# Altium footprint library MY_LIB_Connectors_CONNFLY.PcbLib: 239 footprints (part 4 of 15)
Each footprint in its own frame and in the unit in brackets; x right, y up, seen from the top. Pads: shape width x height; smd on the part's side, far side on the other; paste and mask are expansions set on the pad; w line width, h text height; cw(c..) or ccw(c..) is an arc to the next point about the centre after c.
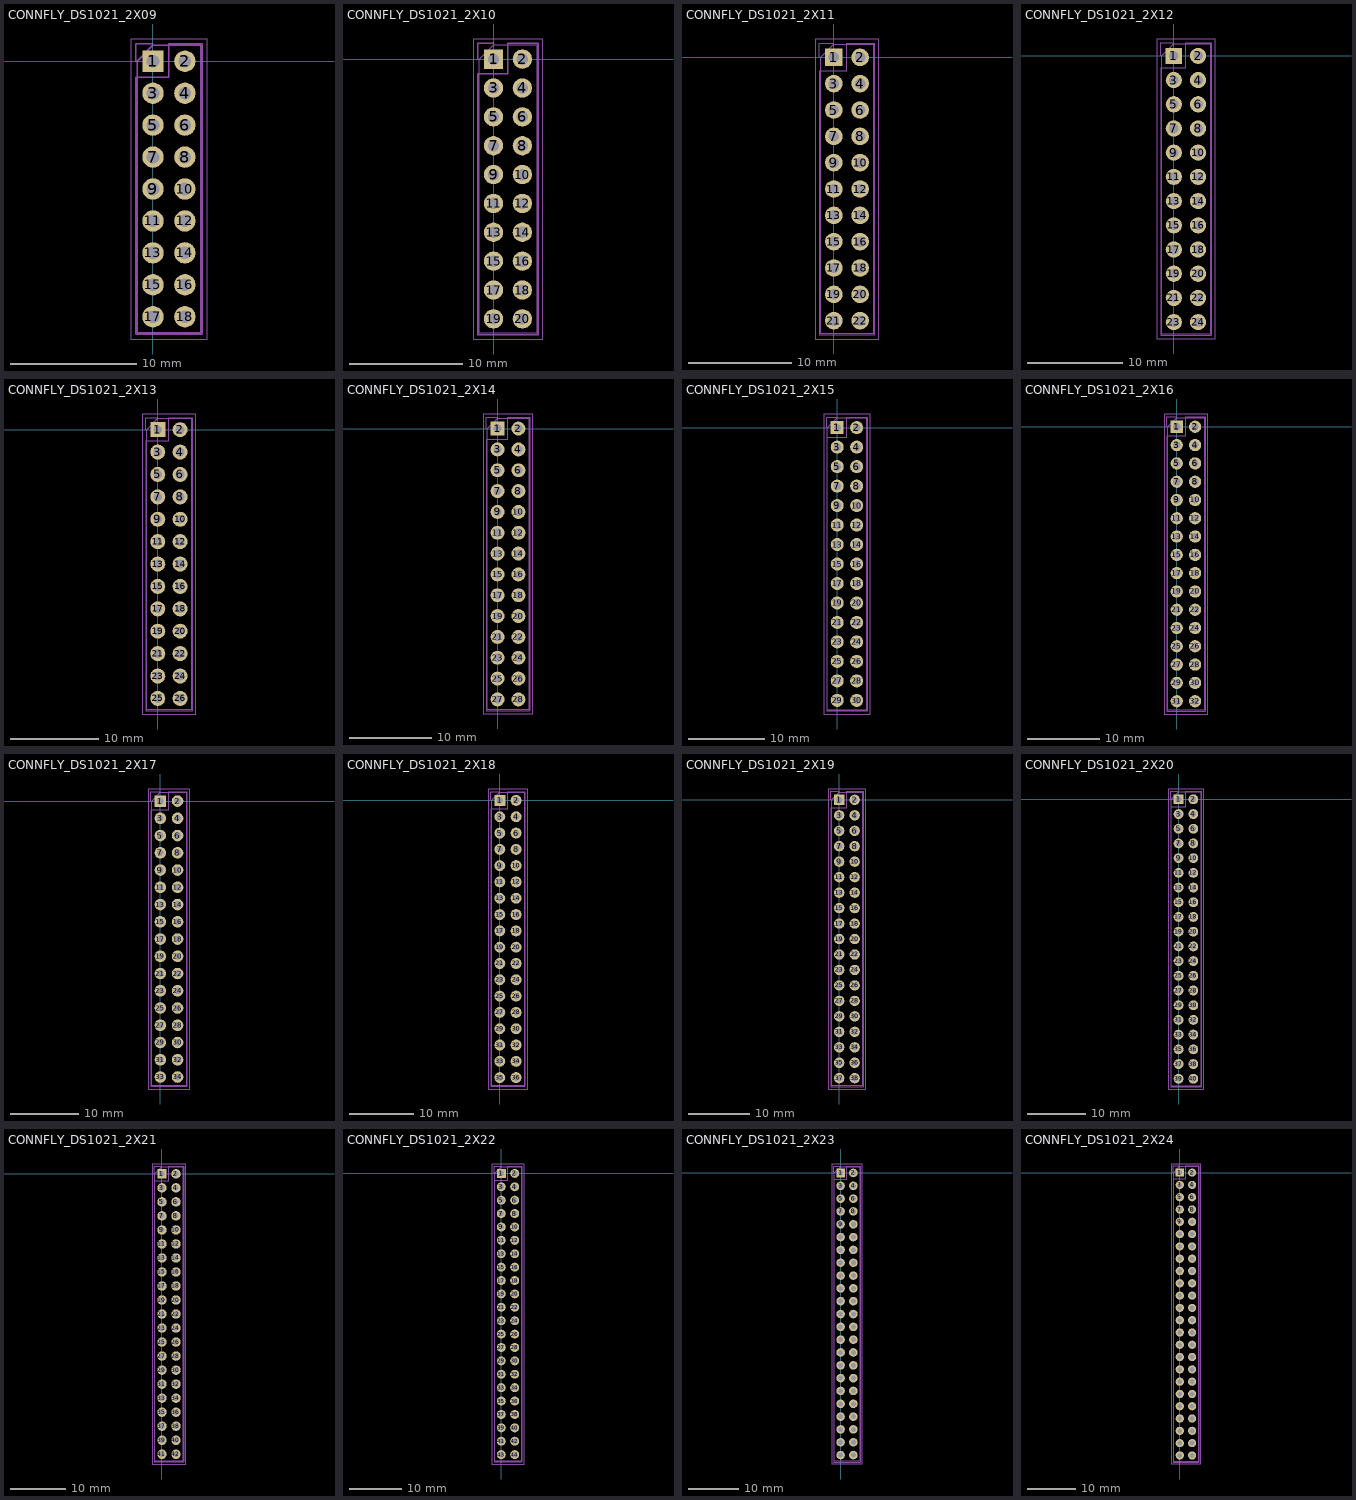
[diagram p3: the footprints below, top view; thin cyan lines are the x and y axes]

## CONNFLY_DS1021_2X09 [mm] "Connfly DS1021 2x9 standard KiCad; PTH1.0 pad1.7 pitch2.54; CC-BY-SA-4.0; STEP generic"
height 8.54
pads (18):
  rect 1.7x1.7 hole 1 paste-2539.97 mask+0.05: 1(0,0)
  round 1.7 hole 1 paste-2539.97 mask+0.05: 2(2.54,0) 3(0,-2.54) 4(2.54,-2.54) 5(0,-5.08) 6(2.54,-5.08) 7(0,-7.62) 8(2.54,-7.62) 9(0,-10.16) 10(2.54,-10.16) 11(0,-12.7) 12(2.54,-12.7) 13(0,-15.24) 14(2.54,-15.24) 15(0,-17.78) 16(2.54,-17.78) 17(0,-20.32) 18(2.54,-20.32)
Mechanical 15:
  lines w0.05: -1.77,-22.09 -1.77,1.77 4.32,1.77 4.32,-22.09 -1.77,-22.09
  lines w0.1: -1.27,-21.59 -1.27,0 0,1.27 3.81,1.27 3.81,-21.59 -1.27,-21.59
  lines w0.12: -1.38,0 -1.38,1.38 0,1.38 ; -1.38,-21.7 -1.38,-1.27 1.27,-1.27 1.27,1.38 3.92,1.38 3.92,-21.7 -1.38,-21.7
3D body "PinHeader_2x09_P2.54mm_Vertical.step": height 8.54, standoff -3, extent -1.27,-21.59 3.81,1.27

## CONNFLY_DS1021_2X10 [mm] "Connfly DS1021 2x10 standard KiCad; PTH1.0 pad1.7 pitch2.54; CC-BY-SA-4.0; STEP generic"
height 8.54
pads (20):
  rect 1.7x1.7 hole 1 paste-2539.97 mask+0.05: 1(0,0)
  round 1.7 hole 1 paste-2539.97 mask+0.05: 2(2.54,0) 3(0,-2.54) 4(2.54,-2.54) 5(0,-5.08) 6(2.54,-5.08) 7(0,-7.62) 8(2.54,-7.62) 9(0,-10.16) 10(2.54,-10.16) 11(0,-12.7) 12(2.54,-12.7) 13(0,-15.24) 14(2.54,-15.24) 15(0,-17.78) 16(2.54,-17.78) 17(0,-20.32) 18(2.54,-20.32) 19(0,-22.86) 20(2.54,-22.86)
Mechanical 15:
  lines w0.05: -1.77,-24.63 -1.77,1.77 4.32,1.77 4.32,-24.63 -1.77,-24.63
  lines w0.1: -1.27,-24.13 -1.27,0 0,1.27 3.81,1.27 3.81,-24.13 -1.27,-24.13
  lines w0.12: -1.38,0 -1.38,1.38 0,1.38 ; -1.38,-24.24 -1.38,-1.27 1.27,-1.27 1.27,1.38 3.92,1.38 3.92,-24.24 -1.38,-24.24
3D body "PinHeader_2x10_P2.54mm_Vertical.step": height 8.54, standoff -3, extent -1.27,-24.13 3.81,1.27

## CONNFLY_DS1021_2X11 [mm] "Connfly DS1021 2x11 standard KiCad; PTH1.0 pad1.7 pitch2.54; CC-BY-SA-4.0; STEP generic"
height 8.54
pads (22):
  rect 1.7x1.7 hole 1 paste-2539.97 mask+0.05: 1(0,0)
  round 1.7 hole 1 paste-2539.97 mask+0.05: 2(2.54,0) 3(0,-2.54) 4(2.54,-2.54) 5(0,-5.08) 6(2.54,-5.08) 7(0,-7.62) 8(2.54,-7.62) 9(0,-10.16) 10(2.54,-10.16) 11(0,-12.7) 12(2.54,-12.7) 13(0,-15.24) 14(2.54,-15.24) 15(0,-17.78) 16(2.54,-17.78) 17(0,-20.32) 18(2.54,-20.32) 19(0,-22.86) 20(2.54,-22.86) 21(0,-25.4) 22(2.54,-25.4)
Mechanical 15:
  lines w0.05: -1.77,-27.17 -1.77,1.77 4.32,1.77 4.32,-27.17 -1.77,-27.17
  lines w0.1: -1.27,-26.67 -1.27,0 0,1.27 3.81,1.27 3.81,-26.67 -1.27,-26.67
  lines w0.12: -1.38,0 -1.38,1.38 0,1.38 ; -1.38,-26.78 -1.38,-1.27 1.27,-1.27 1.27,1.38 3.92,1.38 3.92,-26.78 -1.38,-26.78
3D body "PinHeader_2x11_P2.54mm_Vertical.step": height 8.54, standoff -3, extent -1.27,-26.67 3.81,1.27

## CONNFLY_DS1021_2X12 [mm] "Connfly DS1021 2x12 standard KiCad; PTH1.0 pad1.7 pitch2.54; CC-BY-SA-4.0; STEP generic"
height 8.54
pads (24):
  rect 1.7x1.7 hole 1 paste-2539.97 mask+0.05: 1(0,0)
  round 1.7 hole 1 paste-2539.97 mask+0.05: 2(2.54,0) 3(0,-2.54) 4(2.54,-2.54) 5(0,-5.08) 6(2.54,-5.08) 7(0,-7.62) 8(2.54,-7.62) 9(0,-10.16) 10(2.54,-10.16) 11(0,-12.7) 12(2.54,-12.7) 13(0,-15.24) 14(2.54,-15.24) 15(0,-17.78) 16(2.54,-17.78) 17(0,-20.32) 18(2.54,-20.32) 19(0,-22.86) 20(2.54,-22.86) 21(0,-25.4) 22(2.54,-25.4) 23(0,-27.94) 24(2.54,-27.94)
Mechanical 15:
  lines w0.05: -1.77,-29.71 -1.77,1.77 4.32,1.77 4.32,-29.71 -1.77,-29.71
  lines w0.1: -1.27,-29.21 -1.27,0 0,1.27 3.81,1.27 3.81,-29.21 -1.27,-29.21
  lines w0.12: -1.38,0 -1.38,1.38 0,1.38 ; -1.38,-29.32 -1.38,-1.27 1.27,-1.27 1.27,1.38 3.92,1.38 3.92,-29.32 -1.38,-29.32
3D body "PinHeader_2x12_P2.54mm_Vertical.step": height 8.54, standoff -3, extent -1.27,-29.21 3.81,1.27

## CONNFLY_DS1021_2X13 [mm] "Connfly DS1021 2x13 standard KiCad; PTH1.0 pad1.7 pitch2.54; CC-BY-SA-4.0; STEP generic"
height 8.54
pads (26):
  rect 1.7x1.7 hole 1 paste-2539.97 mask+0.05: 1(0,0)
  round 1.7 hole 1 paste-2539.97 mask+0.05: 2(2.54,0) 3(0,-2.54) 4(2.54,-2.54) 5(0,-5.08) 6(2.54,-5.08) 7(0,-7.62) 8(2.54,-7.62) 9(0,-10.16) 10(2.54,-10.16) 11(0,-12.7) 12(2.54,-12.7) 13(0,-15.24) 14(2.54,-15.24) 15(0,-17.78) 16(2.54,-17.78) 17(0,-20.32) 18(2.54,-20.32) 19(0,-22.86) 20(2.54,-22.86) 21(0,-25.4) 22(2.54,-25.4) 23(0,-27.94) 24(2.54,-27.94) 25(0,-30.48) 26(2.54,-30.48)
Mechanical 15:
  lines w0.05: -1.77,-32.25 -1.77,1.78 4.32,1.78 4.32,-32.25 -1.77,-32.25
  lines w0.1: -1.27,-31.75 -1.27,0 0,1.27 3.81,1.27 3.81,-31.75 -1.27,-31.75
  lines w0.12: -1.38,0 -1.38,1.38 0,1.38 ; -1.38,-31.86 -1.38,-1.27 1.27,-1.27 1.27,1.38 3.92,1.38 3.92,-31.86 -1.38,-31.86
3D body "PinHeader_2x13_P2.54mm_Vertical.step": height 8.54, standoff -3, extent -1.27,-31.75 3.81,1.27

## CONNFLY_DS1021_2X14 [mm] "Connfly DS1021 2x14 standard KiCad; PTH1.0 pad1.7 pitch2.54; CC-BY-SA-4.0; STEP generic"
height 8.54
pads (28):
  rect 1.7x1.7 hole 1 paste-2539.97 mask+0.05: 1(0,0)
  round 1.7 hole 1 paste-2539.97 mask+0.05: 2(2.54,0) 3(0,-2.54) 4(2.54,-2.54) 5(0,-5.08) 6(2.54,-5.08) 7(0,-7.62) 8(2.54,-7.62) 9(0,-10.16) 10(2.54,-10.16) 11(0,-12.7) 12(2.54,-12.7) 13(0,-15.24) 14(2.54,-15.24) 15(0,-17.78) 16(2.54,-17.78) 17(0,-20.32) 18(2.54,-20.32) 19(0,-22.86) 20(2.54,-22.86) 21(0,-25.4) 22(2.54,-25.4) 23(0,-27.94) 24(2.54,-27.94) 25(0,-30.48) 26(2.54,-30.48) 27(0,-33.02) 28(2.54,-33.02)
Mechanical 15:
  lines w0.05: -1.77,-34.8 -1.77,1.78 4.32,1.78 4.32,-34.8 -1.77,-34.8
  lines w0.1: -1.27,-34.29 -1.27,0 0,1.27 3.81,1.27 3.81,-34.29 -1.27,-34.29
  lines w0.12: -1.38,0 -1.38,1.38 0,1.38 ; -1.38,-34.4 -1.38,-1.27 1.27,-1.27 1.27,1.38 3.92,1.38 3.92,-34.4 -1.38,-34.4
3D body "PinHeader_2x14_P2.54mm_Vertical.step": height 8.54, standoff -3, extent -1.27,-34.29 3.81,1.27

## CONNFLY_DS1021_2X15 [mm] "Connfly DS1021 2x15 standard KiCad; PTH1.0 pad1.7 pitch2.54; CC-BY-SA-4.0; STEP generic"
height 8.54
pads (30):
  rect 1.7x1.7 hole 1 paste-2539.97 mask+0.05: 1(0,0)
  round 1.7 hole 1 paste-2539.97 mask+0.05: 2(2.54,0) 3(0,-2.54) 4(2.54,-2.54) 5(0,-5.08) 6(2.54,-5.08) 7(0,-7.62) 8(2.54,-7.62) 9(0,-10.16) 10(2.54,-10.16) 11(0,-12.7) 12(2.54,-12.7) 13(0,-15.24) 14(2.54,-15.24) 15(0,-17.78) 16(2.54,-17.78) 17(0,-20.32) 18(2.54,-20.32) 19(0,-22.86) 20(2.54,-22.86) 21(0,-25.4) 22(2.54,-25.4) 23(0,-27.94) 24(2.54,-27.94) 25(0,-30.48) 26(2.54,-30.48) 27(0,-33.02) 28(2.54,-33.02) 29(0,-35.56) 30(2.54,-35.56)
Mechanical 15:
  lines w0.05: -1.77,-37.34 -1.77,1.78 4.32,1.78 4.32,-37.34 -1.77,-37.34
  lines w0.1: -1.27,-36.83 -1.27,0 0,1.27 3.81,1.27 3.81,-36.83 -1.27,-36.83
  lines w0.12: -1.38,0 -1.38,1.38 0,1.38 ; -1.38,-36.94 -1.38,-1.27 1.27,-1.27 1.27,1.38 3.92,1.38 3.92,-36.94 -1.38,-36.94
3D body "PinHeader_2x15_P2.54mm_Vertical.step": height 8.54, standoff -3, extent -1.27,-36.83 3.81,1.27

## CONNFLY_DS1021_2X16 [mm] "Connfly DS1021 2x16 standard KiCad; PTH1.0 pad1.7 pitch2.54; CC-BY-SA-4.0; STEP generic"
height 8.54
pads (32):
  rect 1.7x1.7 hole 1 paste-2539.97 mask+0.05: 1(0,0)
  round 1.7 hole 1 paste-2539.97 mask+0.05: 2(2.54,0) 3(0,-2.54) 4(2.54,-2.54) 5(0,-5.08) 6(2.54,-5.08) 7(0,-7.62) 8(2.54,-7.62) 9(0,-10.16) 10(2.54,-10.16) 11(0,-12.7) 12(2.54,-12.7) 13(0,-15.24) 14(2.54,-15.24) 15(0,-17.78) 16(2.54,-17.78) 17(0,-20.32) 18(2.54,-20.32) 19(0,-22.86) 20(2.54,-22.86) 21(0,-25.4) 22(2.54,-25.4) 23(0,-27.94) 24(2.54,-27.94) 25(0,-30.48) 26(2.54,-30.48) 27(0,-33.02) 28(2.54,-33.02) 29(0,-35.56) 30(2.54,-35.56) 31(0,-38.1) 32(2.54,-38.1)
Mechanical 15:
  lines w0.05: -1.77,-39.88 -1.77,1.78 4.32,1.78 4.32,-39.88 -1.77,-39.88
  lines w0.1: -1.27,-39.37 -1.27,0 0,1.27 3.81,1.27 3.81,-39.37 -1.27,-39.37
  lines w0.12: -1.38,0 -1.38,1.38 0,1.38 ; -1.38,-39.48 -1.38,-1.27 1.27,-1.27 1.27,1.38 3.92,1.38 3.92,-39.48 -1.38,-39.48
3D body "PinHeader_2x16_P2.54mm_Vertical.step": height 8.54, standoff -3, extent -1.27,-39.37 3.81,1.27

## CONNFLY_DS1021_2X17 [mm] "Connfly DS1021 2x17 standard KiCad; PTH1.0 pad1.7 pitch2.54; CC-BY-SA-4.0; STEP generic"
height 8.54
pads (34):
  rect 1.7x1.7 hole 1 paste-2539.97 mask+0.05: 1(0,0)
  round 1.7 hole 1 paste-2539.97 mask+0.05: 2(2.54,0) 3(0,-2.54) 4(2.54,-2.54) 5(0,-5.08) 6(2.54,-5.08) 7(0,-7.62) 8(2.54,-7.62) 9(0,-10.16) 10(2.54,-10.16) 11(0,-12.7) 12(2.54,-12.7) 13(0,-15.24) 14(2.54,-15.24) 15(0,-17.78) 16(2.54,-17.78) 17(0,-20.32) 18(2.54,-20.32) 19(0,-22.86) 20(2.54,-22.86) 21(0,-25.4) 22(2.54,-25.4) 23(0,-27.94) 24(2.54,-27.94) 25(0,-30.48) 26(2.54,-30.48) 27(0,-33.02) 28(2.54,-33.02) 29(0,-35.56) 30(2.54,-35.56) 31(0,-38.1) 32(2.54,-38.1) 33(0,-40.64) 34(2.54,-40.64)
Mechanical 15:
  lines w0.05: -1.77,-42.41 -1.77,1.78 4.32,1.78 4.32,-42.41 -1.77,-42.41
  lines w0.1: -1.27,-41.91 -1.27,0 0,1.27 3.81,1.27 3.81,-41.91 -1.27,-41.91
  lines w0.12: -1.38,0 -1.38,1.38 0,1.38 ; -1.38,-42.02 -1.38,-1.27 1.27,-1.27 1.27,1.38 3.92,1.38 3.92,-42.02 -1.38,-42.02
3D body "PinHeader_2x17_P2.54mm_Vertical.step": height 8.54, standoff -3, extent -1.27,-41.91 3.81,1.27

## CONNFLY_DS1021_2X18 [mm] "Connfly DS1021 2x18 standard KiCad; PTH1.0 pad1.7 pitch2.54; CC-BY-SA-4.0; STEP generic"
height 8.54
pads (36):
  rect 1.7x1.7 hole 1 paste-2539.97 mask+0.05: 1(0,0)
  round 1.7 hole 1 paste-2539.97 mask+0.05: 2(2.54,0) 3(0,-2.54) 4(2.54,-2.54) 5(0,-5.08) 6(2.54,-5.08) 7(0,-7.62) 8(2.54,-7.62) 9(0,-10.16) 10(2.54,-10.16) 11(0,-12.7) 12(2.54,-12.7) 13(0,-15.24) 14(2.54,-15.24) 15(0,-17.78) 16(2.54,-17.78) 17(0,-20.32) 18(2.54,-20.32) 19(0,-22.86) 20(2.54,-22.86) 21(0,-25.4) 22(2.54,-25.4) 23(0,-27.94) 24(2.54,-27.94) 25(0,-30.48) 26(2.54,-30.48) 27(0,-33.02) 28(2.54,-33.02) 29(0,-35.56) 30(2.54,-35.56) 31(0,-38.1) 32(2.54,-38.1) 33(0,-40.64) 34(2.54,-40.64) 35(0,-43.18) 36(2.54,-43.18)
Mechanical 15:
  lines w0.05: -1.77,-44.95 -1.77,1.78 4.32,1.78 4.32,-44.95 -1.77,-44.95
  lines w0.1: -1.27,-44.45 -1.27,0 0,1.27 3.81,1.27 3.81,-44.45 -1.27,-44.45
  lines w0.12: -1.38,0 -1.38,1.38 0,1.38 ; -1.38,-44.56 -1.38,-1.27 1.27,-1.27 1.27,1.38 3.92,1.38 3.92,-44.56 -1.38,-44.56
3D body "PinHeader_2x18_P2.54mm_Vertical.step": height 8.54, standoff -3, extent -1.27,-44.45 3.81,1.27

## CONNFLY_DS1021_2X19 [mm] "Connfly DS1021 2x19 standard KiCad; PTH1.0 pad1.7 pitch2.54; CC-BY-SA-4.0; STEP generic"
height 8.54
pads (38):
  rect 1.7x1.7 hole 1 paste-2539.97 mask+0.05: 1(0,0)
  round 1.7 hole 1 paste-2539.97 mask+0.05: 2(2.54,0) 3(0,-2.54) 4(2.54,-2.54) 5(0,-5.08) 6(2.54,-5.08) 7(0,-7.62) 8(2.54,-7.62) 9(0,-10.16) 10(2.54,-10.16) 11(0,-12.7) 12(2.54,-12.7) 13(0,-15.24) 14(2.54,-15.24) 15(0,-17.78) 16(2.54,-17.78) 17(0,-20.32) 18(2.54,-20.32) 19(0,-22.86) 20(2.54,-22.86) 21(0,-25.4) 22(2.54,-25.4) 23(0,-27.94) 24(2.54,-27.94) 25(0,-30.48) 26(2.54,-30.48) 27(0,-33.02) 28(2.54,-33.02) 29(0,-35.56) 30(2.54,-35.56) 31(0,-38.1) 32(2.54,-38.1) 33(0,-40.64) 34(2.54,-40.64) 35(0,-43.18) 36(2.54,-43.18) 37(0,-45.72) 38(2.54,-45.72)
Mechanical 15:
  lines w0.05: -1.77,-47.49 -1.77,1.78 4.32,1.78 4.32,-47.49 -1.77,-47.49
  lines w0.1: -1.27,-46.99 -1.27,0 0,1.27 3.81,1.27 3.81,-46.99 -1.27,-46.99
  lines w0.12: -1.38,0 -1.38,1.38 0,1.38 ; -1.38,-47.1 -1.38,-1.27 1.27,-1.27 1.27,1.38 3.92,1.38 3.92,-47.1 -1.38,-47.1
3D body "PinHeader_2x19_P2.54mm_Vertical.step": height 8.54, standoff -3, extent -1.27,-46.99 3.81,1.27

## CONNFLY_DS1021_2X20 [mm] "Connfly DS1021 2x20 standard KiCad; PTH1.0 pad1.7 pitch2.54; CC-BY-SA-4.0; STEP generic"
height 8.54
pads (40):
  rect 1.7x1.7 hole 1 paste-2539.97 mask+0.05: 1(0,0)
  round 1.7 hole 1 paste-2539.97 mask+0.05: 2(2.54,0) 3(0,-2.54) 4(2.54,-2.54) 5(0,-5.08) 6(2.54,-5.08) 7(0,-7.62) 8(2.54,-7.62) 9(0,-10.16) 10(2.54,-10.16) 11(0,-12.7) 12(2.54,-12.7) 13(0,-15.24) 14(2.54,-15.24) 15(0,-17.78) 16(2.54,-17.78) 17(0,-20.32) 18(2.54,-20.32) 19(0,-22.86) 20(2.54,-22.86) 21(0,-25.4) 22(2.54,-25.4) 23(0,-27.94) 24(2.54,-27.94) 25(0,-30.48) 26(2.54,-30.48) 27(0,-33.02) 28(2.54,-33.02) 29(0,-35.56) 30(2.54,-35.56) 31(0,-38.1) 32(2.54,-38.1) 33(0,-40.64) 34(2.54,-40.64) 35(0,-43.18) 36(2.54,-43.18) 37(0,-45.72) 38(2.54,-45.72) 39(0,-48.26) 40(2.54,-48.26)
Mechanical 15:
  lines w0.05: -1.77,-50.03 -1.77,1.78 4.32,1.78 4.32,-50.03 -1.77,-50.03
  lines w0.1: -1.27,-49.53 -1.27,0 0,1.27 3.81,1.27 3.81,-49.53 -1.27,-49.53
  lines w0.12: -1.38,0 -1.38,1.38 0,1.38 ; -1.38,-49.64 -1.38,-1.27 1.27,-1.27 1.27,1.38 3.92,1.38 3.92,-49.64 -1.38,-49.64
3D body "PinHeader_2x20_P2.54mm_Vertical.step": height 8.54, standoff -3, extent -1.27,-49.53 3.81,1.27

## CONNFLY_DS1021_2X21 [mm] "Connfly DS1021 2x21 standard KiCad; PTH1.0 pad1.7 pitch2.54; CC-BY-SA-4.0; STEP generic"
height 8.54
pads (42):
  rect 1.7x1.7 hole 1 paste-2539.97 mask+0.05: 1(0,0)
  round 1.7 hole 1 paste-2539.97 mask+0.05: 2(2.54,0) 3(0,-2.54) 4(2.54,-2.54) 5(0,-5.08) 6(2.54,-5.08) 7(0,-7.62) 8(2.54,-7.62) 9(0,-10.16) 10(2.54,-10.16) 11(0,-12.7) 12(2.54,-12.7) 13(0,-15.24) 14(2.54,-15.24) 15(0,-17.78) 16(2.54,-17.78) 17(0,-20.32) 18(2.54,-20.32) 19(0,-22.86) 20(2.54,-22.86) 21(0,-25.4) 22(2.54,-25.4) 23(0,-27.94) 24(2.54,-27.94) 25(0,-30.48) 26(2.54,-30.48) 27(0,-33.02) 28(2.54,-33.02) 29(0,-35.56) 30(2.54,-35.56) 31(0,-38.1) 32(2.54,-38.1) 33(0,-40.64) 34(2.54,-40.64) 35(0,-43.18) 36(2.54,-43.18) 37(0,-45.72) 38(2.54,-45.72) 39(0,-48.26) 40(2.54,-48.26) 41(0,-50.8) 42(2.54,-50.8)
Mechanical 15:
  lines w0.05: -1.77,-52.57 -1.77,1.78 4.32,1.78 4.32,-52.57 -1.77,-52.57
  lines w0.1: -1.27,-52.07 -1.27,0 0,1.27 3.81,1.27 3.81,-52.07 -1.27,-52.07
  lines w0.12: -1.38,0 -1.38,1.38 0,1.38 ; -1.38,-52.18 -1.38,-1.27 1.27,-1.27 1.27,1.38 3.92,1.38 3.92,-52.18 -1.38,-52.18
3D body "PinHeader_2x21_P2.54mm_Vertical.step": height 8.54, standoff -3, extent -1.27,-52.07 3.81,1.27

## CONNFLY_DS1021_2X22 [mm] "Connfly DS1021 2x22 standard KiCad; PTH1.0 pad1.7 pitch2.54; CC-BY-SA-4.0; STEP generic"
height 8.54
pads (44):
  rect 1.7x1.7 hole 1 paste-2539.97 mask+0.05: 1(0,0)
  round 1.7 hole 1 paste-2539.97 mask+0.05: 2(2.54,0) 3(0,-2.54) 4(2.54,-2.54) 5(0,-5.08) 6(2.54,-5.08) 7(0,-7.62) 8(2.54,-7.62) 9(0,-10.16) 10(2.54,-10.16) 11(0,-12.7) 12(2.54,-12.7) 13(0,-15.24) 14(2.54,-15.24) 15(0,-17.78) 16(2.54,-17.78) 17(0,-20.32) 18(2.54,-20.32) 19(0,-22.86) 20(2.54,-22.86) 21(0,-25.4) 22(2.54,-25.4) 23(0,-27.94) 24(2.54,-27.94) 25(0,-30.48) 26(2.54,-30.48) 27(0,-33.02) 28(2.54,-33.02) 29(0,-35.56) 30(2.54,-35.56) 31(0,-38.1) 32(2.54,-38.1) 33(0,-40.64) 34(2.54,-40.64) 35(0,-43.18) 36(2.54,-43.18) 37(0,-45.72) 38(2.54,-45.72) 39(0,-48.26) 40(2.54,-48.26) 41(0,-50.8) 42(2.54,-50.8) 43(0,-53.34) 44(2.54,-53.34)
Mechanical 15:
  lines w0.05: -1.77,-55.12 -1.77,1.78 4.32,1.78 4.32,-55.12 -1.77,-55.12
  lines w0.1: -1.27,-54.61 -1.27,0 0,1.27 3.81,1.27 3.81,-54.61 -1.27,-54.61
  lines w0.12: -1.38,0 -1.38,1.38 0,1.38 ; -1.38,-54.72 -1.38,-1.27 1.27,-1.27 1.27,1.38 3.92,1.38 3.92,-54.72 -1.38,-54.72
3D body "PinHeader_2x22_P2.54mm_Vertical.step": height 8.54, standoff -3, extent -1.27,-54.61 3.81,1.27

## CONNFLY_DS1021_2X23 [mm] "Connfly DS1021 2x23 standard KiCad; PTH1.0 pad1.7 pitch2.54; CC-BY-SA-4.0; STEP generic"
height 8.54
pads (46):
  rect 1.7x1.7 hole 1 paste-2539.97 mask+0.05: 1(0,0)
  round 1.7 hole 1 paste-2539.97 mask+0.05: 2(2.54,0) 3(0,-2.54) 4(2.54,-2.54) 5(0,-5.08) 6(2.54,-5.08) 7(0,-7.62) 8(2.54,-7.62) 9(0,-10.16) 10(2.54,-10.16) 11(0,-12.7) 12(2.54,-12.7) 13(0,-15.24) 14(2.54,-15.24) 15(0,-17.78) 16(2.54,-17.78) 17(0,-20.32) 18(2.54,-20.32) 19(0,-22.86) 20(2.54,-22.86) 21(0,-25.4) 22(2.54,-25.4) 23(0,-27.94) 24(2.54,-27.94) 25(0,-30.48) 26(2.54,-30.48) 27(0,-33.02) 28(2.54,-33.02) 29(0,-35.56) 30(2.54,-35.56) 31(0,-38.1) 32(2.54,-38.1) 33(0,-40.64) 34(2.54,-40.64) 35(0,-43.18) 36(2.54,-43.18) 37(0,-45.72) 38(2.54,-45.72) 39(0,-48.26) 40(2.54,-48.26) 41(0,-50.8) 42(2.54,-50.8) 43(0,-53.34) 44(2.54,-53.34) 45(0,-55.88) 46(2.54,-55.88)
Mechanical 15:
  lines w0.05: -1.77,-57.65 -1.77,1.78 4.32,1.78 4.32,-57.65 -1.77,-57.65
  lines w0.1: -1.27,-57.15 -1.27,0 0,1.27 3.81,1.27 3.81,-57.15 -1.27,-57.15
  lines w0.12: -1.38,0 -1.38,1.38 0,1.38 ; -1.38,-57.26 -1.38,-1.27 1.27,-1.27 1.27,1.38 3.92,1.38 3.92,-57.26 -1.38,-57.26
3D body "PinHeader_2x23_P2.54mm_Vertical.step": height 8.54, standoff -3, extent -1.27,-57.15 3.81,1.27

## CONNFLY_DS1021_2X24 [mm] "Connfly DS1021 2x24 standard KiCad; PTH1.0 pad1.7 pitch2.54; CC-BY-SA-4.0; STEP generic"
height 8.54
pads (48):
  rect 1.7x1.7 hole 1 paste-2539.97 mask+0.05: 1(0,0)
  round 1.7 hole 1 paste-2539.97 mask+0.05: 2(2.54,0) 3(0,-2.54) 4(2.54,-2.54) 5(0,-5.08) 6(2.54,-5.08) 7(0,-7.62) 8(2.54,-7.62) 9(0,-10.16) 10(2.54,-10.16) 11(0,-12.7) 12(2.54,-12.7) 13(0,-15.24) 14(2.54,-15.24) 15(0,-17.78) 16(2.54,-17.78) 17(0,-20.32) 18(2.54,-20.32) 19(0,-22.86) 20(2.54,-22.86) 21(0,-25.4) 22(2.54,-25.4) 23(0,-27.94) 24(2.54,-27.94) 25(0,-30.48) 26(2.54,-30.48) 27(0,-33.02) 28(2.54,-33.02) 29(0,-35.56) 30(2.54,-35.56) 31(0,-38.1) 32(2.54,-38.1) 33(0,-40.64) 34(2.54,-40.64) 35(0,-43.18) 36(2.54,-43.18) 37(0,-45.72) 38(2.54,-45.72) 39(0,-48.26) 40(2.54,-48.26) 41(0,-50.8) 42(2.54,-50.8) 43(0,-53.34) 44(2.54,-53.34) 45(0,-55.88) 46(2.54,-55.88) 47(0,-58.42) 48(2.54,-58.42)
Mechanical 15:
  lines w0.05: -1.77,-60.19 -1.77,1.78 4.32,1.78 4.32,-60.19 -1.77,-60.19
  lines w0.1: -1.27,-59.69 -1.27,0 0,1.27 3.81,1.27 3.81,-59.69 -1.27,-59.69
  lines w0.12: -1.38,0 -1.38,1.38 0,1.38 ; -1.38,-59.8 -1.38,-1.27 1.27,-1.27 1.27,1.38 3.92,1.38 3.92,-59.8 -1.38,-59.8
3D body "PinHeader_2x24_P2.54mm_Vertical.step": height 8.54, standoff -3, extent -1.27,-59.69 3.81,1.27